# Altium footprint library MOD_BUCK_MP1584.PcbLib: 1 footprints
Each footprint in its own frame and in the unit in brackets; x right, y up, seen from the top. Pads: shape width x height; smd on the part's side, far side on the other; paste and mask are expansions set on the pad; w line width, h text height; cw(c..) or ccw(c..) is an arc to the next point about the centre after c.
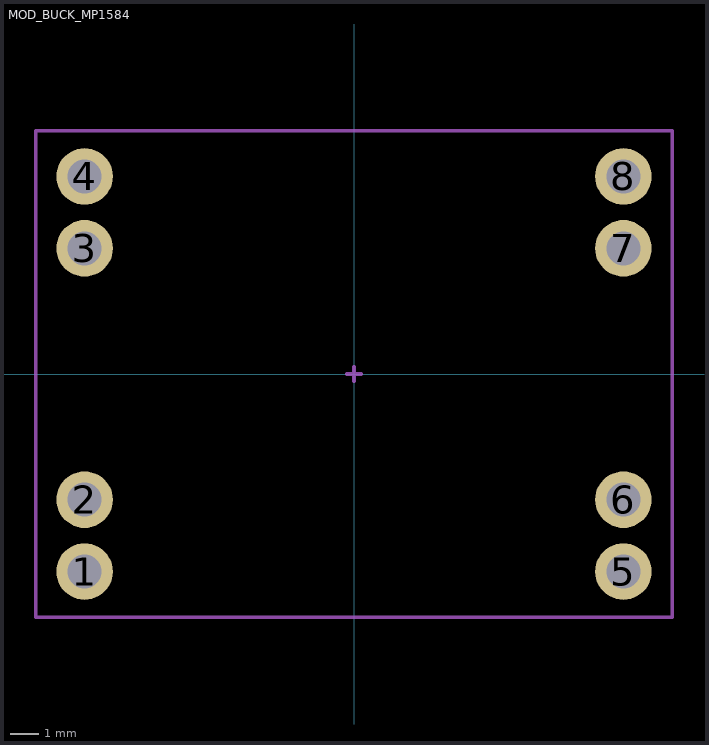
[diagram p0: the footprint, top view; thin cyan lines are the x and y axes]

## MOD_BUCK_MP1584 [mm] "Normal"
pads (8):
  round 2 hole 1.2: 1(-9.525,-6.985) 2(-9.525,-4.445) 3(-9.525,4.445) 4(-9.525,6.985) 5(9.525,-6.985) 6(9.525,-4.445) 7(9.525,4.445) 8(9.525,6.985)
Mechanical 13:
  lines w0.127: -11.25,-8.6 11.25,-8.6 11.25,8.6 -11.25,8.6 -11.25,-8.6
Mechanical 15:
  lines w0.127: -0.254,0 0.254,0 ; 0,-0.254 0,0.254 ; -11.25,-8.6 11.25,-8.6 11.25,8.6 -11.25,8.6 -11.25,-8.6
3D body "dcdc.step": height 6.69, standoff -2.66, extent -11.25,-8.65 11.25,8.65